# Altium schematic symbol library Inductor.SchLib: 326 symbols (part 7 of 7)
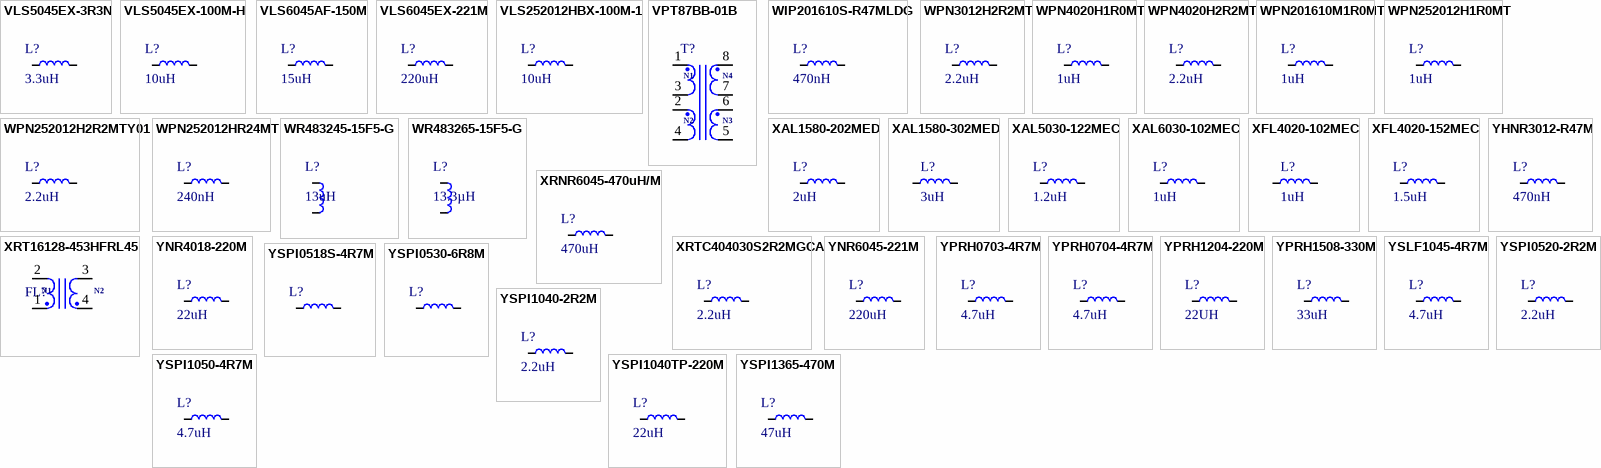
[diagram p14: symbols VLS5045EX-3R3N to YSPI1365-470M]

## YSLF1045-4R7M
designator L?, comment 4.7uH
4.5A 4.7uH ±20% SMD,10.1x10.1mm Power Inductors ROHS; Manufacturer: YJYCOIN; Manufacturer Part Number: YSLF1045-4R7M; Package: SMD,10.1x10.1mm; LCSC Part Number: C693870; Item Type: Inductor; ComponentLink1Description: LCSC; ComponentLink1URL: https://www.lcsc.com/product-detail/Power-Inductors_YJYCOIN-YSLF1045-4R7M_C693870.html
footprint YSLF1045-4R7M
pins: 1, 2

## YSPI0518S-4R7M
designator L?
4.7uH Molded Inductor ±20% SMD,5.4x5.2mm Fixed Inductors ROHS; Manufacturer: YJYCOIN; Manufacturer Part Number: YSPI0518S-4R7M; Package: SMD,5.4x5.2mm; LCSC Part Number: C46595826; Item type: Inductor
footprint YSPI0518S-4R7M
pins: 1, 2

## YSPI0520-2R2M
designator L?, comment 2.2uH
4A 2.2uH ±20% 32mΩ SMD,5.4x5.2x2mm Power Inductors ROHS; Manufacturer: YJYCOIN; Manufacturer Part Number: YSPI0520-2R2M; Footprint: Custom; ComponentLink1Description: LCSC; ComponentLink1URL: https://www.lcsc.com/product-detail/Power-Inductors_YJYCOIN-YSPI0520-2R2M_C718375.html; LCSC Part Number: C718375; Item Type: Inductor
footprint YSPI0520-2R2M_
pins: 1, 2

## YSPI0530-6R8M
designator L?
3A 6.8uH ±20% SMD,5.4x5.2x3mm Power Inductors ROHS; Manufacturer: YJYCOIN; Manufacturer Part Number: YSPI0530-6R8M; Supplier: LCSC; LCSC Part Number: C718382; RoHS: No; Item Type: Inductor
footprint YSPI0530-6R8M
pins: 1, 2

## YSPI1040-2R2M
designator L?, comment 2.2uH
14A 2.2uH ±20% SMD,10.1x10.1mm Power Inductors ROHS; Manufacturer: YJYCOIN; Manufacturer Part Number: YSPI1040-2R2M; Package: SMD,10.1x10.1mm; LCSC Part Number: C351101; Item Type: Inductor; ComponentLink1Description: LCSC; ComponentLink1URL: https://www.lcsc.com/product-detail/Power-Inductors_YJYCOIN-YSPI1040-2R2M_C351101.html
footprint YSPI1040-2R2M
pins: 1, 2

## YSPI1040TP-220M
designator L?, comment 22uH
6A 22uH Integrated molded inductor ±20% 9A SMD,10.5x10.3mm Power Inductors ROHS; Manufacturer: YJYCOIN; Manufacturer Part Number: YSPI1040TP-220M; Package: SMD,10.5x10.3mm; LCSC Part Number: C20417192; Item Type: Power Inductors; ComponentLink1Description: LCSC; ComponentLink1URL: https://www.lcsc.com/product-detail/Power-Inductors_YJYCOIN-YSPI1040TP-220M_C20417192.html
footprint YSPI1040TP-220M
pins: 1, 2

## YSPI1050-4R7M
designator L?, comment 4.7uH
8A 4.7uH ±20% SMD,10x10.1mm Power Inductors ROHS; Manufacturer: YJYCOIN; Manufacturer Part Number: YSPI1050-4R7M; Package: SMD,10.1x10.1mm; LCSC Part Number: C497895; Item Type: Inductor; ComponentLink1Description: LCSC; ComponentLink1URL: https://www.lcsc.com/product-detail/Power-Inductors_YJYCOIN-YSPI1050-4R7M_C497895.html
footprint YSPI1050-4R7M
pins: 1, 2

## YSPI1365-470M
designator L?, comment 47uH
5A 47uH ±20% 57.5mΩ SMD,13.8x12.6x6.5mm Power Inductors ROHS; Manufacturer: YJYCOIN; Manufacturer Part Number: YSPI1365-470M; Package: SMD,13.8x12.6x6.5mm; LCSC Part Number: C497913; Item Type: Inductor; ComponentLink1Description: LCSC; ComponentLink1URL: https://www.lcsc.com/product-detail/Power-Inductors_YJYCOIN-YSPI1365-470M_C497913.html
footprint YSPI1365-470M
pins: 1, 2

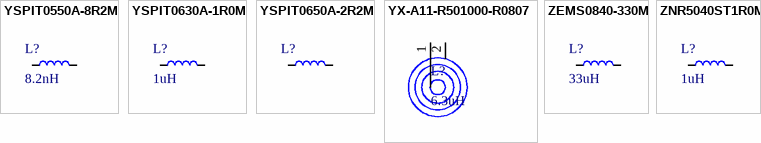
[diagram p8: symbols YSPIT0550A-8R2M to ZNR5040ST1R0M]

## YSPIT0550A-8R2M
designator L?, comment 8.2nH
8.2uH ±20% 7.2A SMD,5.5x5.3mm Power Inductors ROHS; Manufacturer: YJYCOIN; Manufacturer Part Number: YSPIT0550A-8R2M; Supplier: LCSC; LCSC Part Number: C18236292; Item Type: Inductors
footprint YSPIT0550A-8R2M
pins: 1, 2

## YSPIT0630A-1R0M
designator L?, comment 1uH
1uH ±20% 23A SMD,6.6x6.4mm Power Inductors ROHS; Manufacturer: YJYCOIN; Manufacturer Part Number: YSPIT0630A-1R0M; Package: SMD,6.6x6.4mm; LCSC Part Number: C18236293; Item Type: Inductor; ComponentLink1Description: LCSC; ComponentLink1URL: https://www.lcsc.com/product-detail/Power-Inductors_YJYCOIN-YSPIT0630A-1R0M_C18236293.html
footprint YSPIT0630A-1R0M
pins: 1, 2

## YSPIT0650A-2R2M
designator L?
13A 2.2uH Molding Choke ±20% 16A SMD,6.4x6.6mm Power Inductors ROHS; Manufacturer: YJYCOIN; Manufacturer Part Number: YSPIT0650A-2R2M; Package: SMD,6.4x6.6mm; LCSC Part Number: C19188691; Item Type: Inductor; ComponentLink1Description: LCSC; ComponentLink1URL: https://www.lcsc.com/product-detail/Power-Inductors_YJYCOIN-YSPIT0650A-2R2M_C19188691.html
footprint YSPIT0650A-2R2M
pins: 1, 2

## YX-A11-R501000-R0807
designator L?, comment 6.3uH
Transmitter 6.3uH 75mΩ ±5% Wireless Charging Coils ROHS; Manufacturer: CND-tek; Manufacturer Part Number: YX-A11-R501000-R0807; Package: -; LCSC Part Number: C424427; Item Type: Wireless Charging Coil; ComponentLink1Description: LCSC; ComponentLink1URL: https://lcsc.com/product-detail/Wireless-Charging-Coils_CND-tek-YX-A11-R501000-R0807_C424427.html
footprint YX-A11-R501000-R0807
pins: 1 11, 2 12

## ZEMS0840-330M
designator L?, comment 33uH
3.5A 33uH Integrated molded inductor ±20% 3.5A SMD,8.8x8.2mm Power Inductors ROHS; Manufacturer: ZE; Manufacturer Part Number: ZEMS0840-330M; Package: SMD,8.8x8.2mm; LCSC Part Number: C41415629; Item Type: Inductor; ComponentLink1Description: LCSC; ComponentLink1URL: https://www.lcsc.com/product-detail/Power-Inductors_ZE-ZEMS0840-330M_C41415629.html
footprint ZEMS0840-330M
pins: 1, 2

## ZNR5040ST1R0M
designator L?, comment 1uH
5A 1uH Shielded Power Inductor ±20% 8A SMD,5x5mm Power Inductors ROHS; Manufacturer: ZE; Manufacturer Part Number: ZNR5040ST1R0M; Package: SMD,5x5mm; LCSC Part Number: C46634764; Item Type: Inductor; ComponentLink1Description: LCSC; ComponentLink1URL: https://www.lcsc.com/product-detail/Power-Inductors_ZE-ZNR5040ST1R0M_C46634764.html
footprint ZNR5040ST1R0M
pins: 1, 2